# Altium schematic symbol library 74LVC125AD_118.SchLib: 1 symbol
Pins are listed as number, name and electrical type; pins without a type are passive.

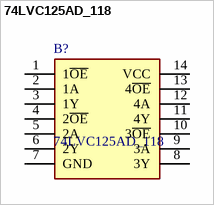
[diagram p0: symbol 74LVC125AD_118]

## 74LVC125AD_118
designator B?
74LVC125A - Quad buffer/line driver with 5 V tolerant input/outputs; 3-state@en-us; Manufacturer_Name: Nexperia; Manufacturer_Part_Number: 74LVC125AD,118; Geometry.Height: 1.75mm; Mouser Part Number: 771-74LVC125AD-T; Mouser Price/Stock: https://www.mouser.co.uk/ProductDetail/Nexperia/74LVC125AD118?qs=me8TqzrmIYXjiwMtzMYzqA%3D%3D; Datasheet Link: https://assets.nexperia.com/documents/data-sheet/74LVC125A.pdf
footprint 74LVC125AD118
pins: 1 1~{OE}, 2 1A, 3 1Y, 4 2~{OE}, 5 2A, 6 2Y, 7 GND, 8 3Y, 9 3A, 10 3~{OE}, 11 4Y, 12 4A, 13 4~{OE}, 14 VCC